# Altium footprint library UD34_Footprints.PcbLib: 1 footprints
Each footprint in its own frame and in the unit in brackets; x right, y up, seen from the top. Pads: shape width x height; smd on the part's side, far side on the other; paste and mask are expansions set on the pad; w line width, h text height; cw(c..) or ccw(c..) is an arc to the next point about the centre after c.
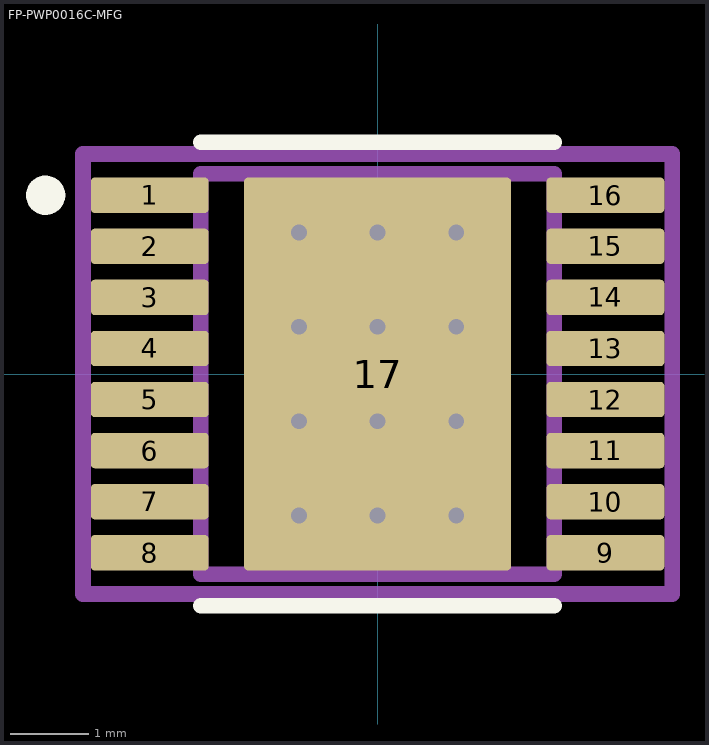
[diagram p0: the footprint, top view; thin cyan lines are the x and y axes]

## FP-PWP0016C-MFG [mm]
pads (17):
  rrect22% 1.5x0.45 smd paste+0 mask+0: 1(-2.9,2.275) 2(-2.9,1.625) 3(-2.9,0.975) 4(-2.9,0.325) 5(-2.9,-0.325) 6(-2.9,-0.975) 7(-2.9,-1.625) 8(-2.9,-2.275) 9(2.9,-2.275) 10(2.9,-1.625) 11(2.9,-0.975) 12(2.9,-0.325) 13(2.9,0.325) 14(2.9,0.975) 15(2.9,1.625) 16(2.9,2.275)
  rrect3% 3.4x5 smd paste-1000 mask-1000: 17(0,0)
via 1,-1.8 diameter 0.5 hole 0.2
via 1,-0.6 diameter 0.5 hole 0.2
via 1,0.6 diameter 0.5 hole 0.2
via 1,1.8 diameter 0.5 hole 0.2
via 0,-1.8 diameter 0.5 hole 0.2
via 0,-0.6 diameter 0.5 hole 0.2
via 0,0.6 diameter 0.5 hole 0.2
via 0,1.8 diameter 0.5 hole 0.2
via -1,-1.8 diameter 0.5 hole 0.2
via -1,-0.6 diameter 0.5 hole 0.2
via -1,0.6 diameter 0.5 hole 0.2
via -1,1.8 diameter 0.5 hole 0.2
Top Overlay:
  circle w0.25: c-4.225,2.275 r0.125
  lines w0.2: -2.25,-2.95 2.25,-2.95 ; -2.25,2.95 2.25,2.95
Top Paste:
  region: -1.23,-1.105 -1.23,1.105 -1.23,1.115 -1.222,1.133 -1.208,1.147 -1.19,1.155 -1.18,1.155 1.18,1.155 1.19,1.155 1.208,1.147 1.222,1.133 1.23,1.115 1.23,1.105 1.23,-1.105 1.23,-1.115 1.222,-1.133 1.208,-1.147 1.19,-1.155 1.18,-1.155 -1.18,-1.155 -1.19,-1.155 -1.208,-1.147 -1.222,-1.133 -1.23,-1.115
Top Solder:
  region: -1.23,-1.105 -1.23,1.105 -1.23,1.115 -1.222,1.133 -1.208,1.147 -1.19,1.155 -1.18,1.155 1.18,1.155 1.19,1.155 1.208,1.147 1.222,1.133 1.23,1.115 1.23,1.105 1.23,-1.105 1.23,-1.115 1.222,-1.133 1.208,-1.147 1.19,-1.155 1.18,-1.155 -1.18,-1.155 -1.19,-1.155 -1.208,-1.147 -1.222,-1.133 -1.23,-1.115
Top Assembly:
  lines w0.2: -3.75,-2.8 -3.75,2.8 3.75,2.8 3.75,-2.8 -3.75,-2.8
  text ".Designator" at 0,0.188 h1
Top 3D Body:
  lines w0.2: -2.25,-2.55 -2.25,2.55 2.25,2.55 2.25,-2.55 -2.25,-2.55
Top Courtyard:
  lines w0.2: -3.75,-2.8 -3.75,2.8 3.75,2.8 3.75,-2.8 -3.75,-2.8
Top Component Center:
  lines w0.1: -0.5,0 0.5,0 ; 0,-0.5 0,0.5
3D body "IC_Texas_Instruments_DRV8876PWPR_eec.STEP": height 0.25, standoff 0, extent -3.75,-2.8 3.75,2.8